# Altium footprint library 2020-05-10_22-41-12.PcbLib: 1 footprints
Each footprint in its own frame and in the unit in brackets; x right, y up, seen from the top. Pads: shape width x height; smd on the part's side, far side on the other; paste and mask are expansions set on the pad; w line width, h text height; cw(c..) or ccw(c..) is an arc to the next point about the centre after c.
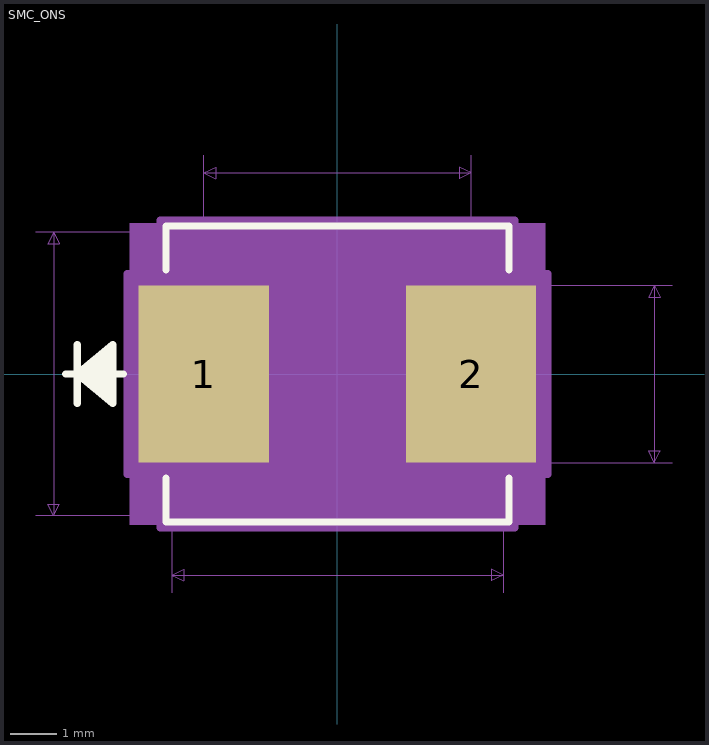
[diagram p0: the footprint, top view; thin cyan lines are the x and y axes]

## SMC_ONS [mil]
pads (2):
  rect 110x150 smd paste+0 mask+0: 1(-113,0) 2(113,0)
Top Overlay:
  lines w6: -230,0 -181.1,0 ; -220,-25 -220,25 ; -190,-20 -220,0 ; -190,-15 -220,0 ; -190,-10 -220,0 ; -190,-5 -220,0 ; -190,5 -220,0 ; -190,10 -220,0 ; -190,15 -220,0 ; -190,20 -220,0 ; -145,-88.1 -145,-125 145,-125 145,-88.1 ; -145,88.1 -145,125 145,125 145,88.1 ; -220,0 -190,25 -190,-25 -220,0
Mechanical 5:
  region: 175.5,-127.5 -175.5,-127.5 -175.5,127.5 175.5,127.5
Mechanical 7:
  lines w1: -255,-120 -140,-120 -140,-185 ; -255,120 -140,120 ; -113,85 -113,185 ; 113,85 113,185 ; 140,-185 140,-120 ; 178,-75 283,-75 ; 178,75 283,75 ; -240,-120 -240,120 ; -240,-120 -245,-110 -235,-110 -240,-120 ; -240,120 -245,110 -235,110 -240,120 ; -140,-170 140,-170 ; -140,-170 -130,-165 -130,-175 -140,-170 ; -113,170 113,170 ; -113,170 -103,175 -103,165 -113,170 ; 113,170 103,175 103,165 113,170 ; 140,-170 130,-165 130,-175 140,-170 ; 268,-75 268,75 ; 268,-75 263,-65 273,-65 268,-75 ; 268,75 263,65 273,65 268,75
  text "Default Padstyle: RX110Y150D0T" at -375,-345 h50
  text "Alt 1 Padstyle: OX60Y90D30P" at -337.5,-420 h50
  text "Alt 2 Padstyle: OX90Y60D30P" at -337.5,-495 h50
  text "0.15in/3.81mm" at 288,-12.5 h25
  text "0.226in/5.74mm" at -87.5,190 h25
  text "0.24in/6.096mm" at -435,-12.5 h25
  text "0.28in/7.112mm" at -87.5,-215 h25
Mechanical 13:
  lines w1: -230,0 -180,0 ; -220,-25 -220,25 ; -190,-20 -220,0 ; -190,-15 -220,0 ; -190,-10 -220,0 ; -190,-5 -220,0 ; -190,5 -220,0 ; -190,10 -220,0 ; -190,15 -220,0 ; -190,20 -220,0 ; -220,0 -190,25 -190,-25 -220,0 ; -140,-120 140,-120 140,120 -140,120 -140,-120
Mechanical 15:
  region: -150,-85 -178,-85 -178,85 -150,85 -150,130 150,130 150,85 178,85 178,-85 150,-85 150,-130 -150,-130
  lines w6: -178,-85 -178,85 -150,85 -150,130 150,130 150,85 178,85 178,-85 150,-85 150,-130 -150,-130 -150,-85 -178,-85
3D body: height 10, standoff 0, extent 0,0 10,10